# Altium footprint library 2020-12-10_20-22-55.PcbLib: 3 footprints
Each footprint in its own frame and in the unit in brackets; x right, y up, seen from the top. Pads: shape width x height; smd on the part's side, far side on the other; paste and mask are expansions set on the pad; w line width, h text height; cw(c..) or ccw(c..) is an arc to the next point about the centre after c.
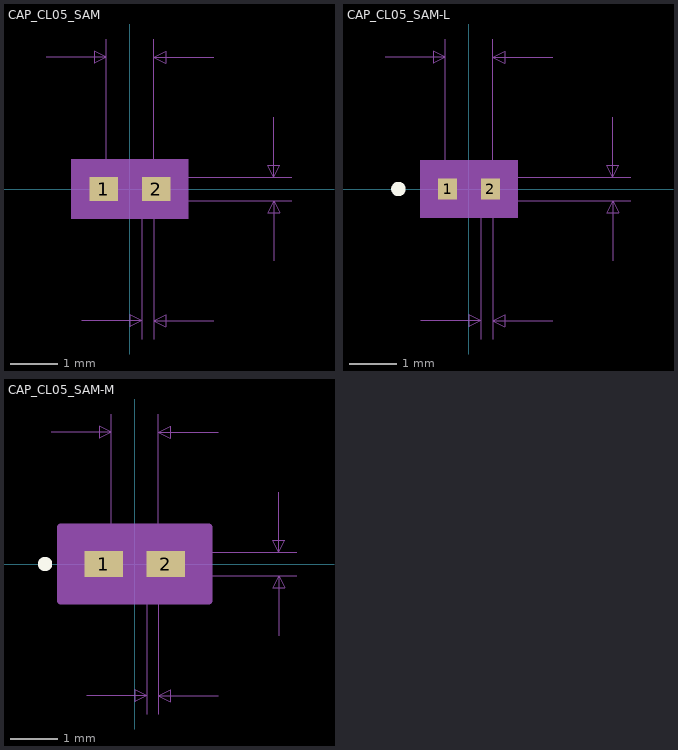
[diagram p0: the footprints below, top view; thin cyan lines are the x and y axes]

## CAP_CL05_SAM [mm]
pads (2):
  rect 0.606x0.5 smd paste+0 mask+0: 1(-0.553,0) 2(0.553,0)
Mechanical 5:
  region: 1.237,-0.631 -1.237,-0.631 -1.237,0.631 1.237,0.631
Mechanical 7:
  lines w0.025: -1.77,2.79 -0.5,2.79 ; -1.02,-2.79 0.25,-2.79 ; -0.5,0 -0.5,3.171 ; 0,-0.25 3.421,-0.25 ; 0,0.25 3.421,0.25 ; 0.25,-3.171 0.25,0 ; 0.5,-3.171 0.5,0 0.5,3.171 ; 1.77,-2.79 0.5,-2.79 ; 1.77,2.79 0.5,2.79 ; 3.04,-1.52 3.04,-0.25 ; 3.04,1.52 3.04,0.25 ; -0.5,2.79 -0.754,2.917 -0.754,2.663 -0.5,2.79 ; 0.25,-2.79 -0.004,-2.663 -0.004,-2.917 0.25,-2.79 ; 0.5,-2.79 0.754,-2.663 0.754,-2.917 0.5,-2.79 ; 0.5,2.79 0.754,2.917 0.754,2.663 0.5,2.79 ; 3.04,-0.25 2.913,-0.504 3.167,-0.504 3.04,-0.25 ; 3.04,0.25 2.913,0.504 3.167,0.504 3.04,0.25
  text "Default Padstyle: RX23p84Y19p69D0T" at -10.795,-7.108 h1.27
  text "Alternate 1 Padstyle: OX60Y90D30P" at -10.477,-9.648 h1.27
  text "Alternate 2 Padstyle: OX90Y60D30P" at -10.477,-12.188 h1.27
  text "0.02in/0.5mm" at 3.548,-0.318 h0.64
  text "0.039in/1mm" at -1.746,3.298 h0.64
  text "0.01in/0.25mm" at -1.689,-3.933 h0.64
Mechanical 13:
  circle w0: c-0.426,0 r0
  lines w0.025: -0.5,-0.25 -0.5,0.25 ; -0.5,-0.25 -0.25,-0.25 -0.25,0.25 -0.5,0.25 ; -0.5,-0.25 0.5,-0.25 ; -0.5,-0.25 -0.5,0.25 ; -0.5,0.25 0.5,0.25 ; 0.5,-0.25 0.25,-0.25 0.25,0.25 0.5,0.25 ; 0.5,-0.25 0.5,0.25 ; 0.5,-0.25 0.5,0.25
Mechanical 15:
  region: 1.11,-0.504 -1.11,-0.504 -1.11,0.504 1.11,0.504
  lines w0.152: -1.11,-0.504 -1.11,0.504 1.11,0.504 1.11,-0.504 -1.11,-0.504
3D body: height 0.25, standoff 0, extent 0,0 0.254,0.254

## CAP_CL05_SAM-L [mm]
pads (2):
  rect 0.402x0.449 smd paste+0 mask+0: 1(-0.451,0) 2(0.451,0)
Top Overlay:
  circle w0.152: c-1.491,0 r0.076
Mechanical 5:
  region: 1.033,-0.606 -1.033,-0.606 -1.033,0.606 1.033,0.606
Mechanical 7:
  lines w0.025: -1.77,2.79 -0.5,2.79 ; -1.02,-2.79 0.25,-2.79 ; -0.5,0 -0.5,3.171 ; 0,-0.25 3.421,-0.25 ; 0,0.25 3.421,0.25 ; 0.25,-3.171 0.25,0 ; 0.5,-3.171 0.5,0 0.5,3.171 ; 1.77,-2.79 0.5,-2.79 ; 1.77,2.79 0.5,2.79 ; 3.04,-1.52 3.04,-0.25 ; 3.04,1.52 3.04,0.25 ; -0.5,2.79 -0.754,2.917 -0.754,2.663 -0.5,2.79 ; 0.25,-2.79 -0.004,-2.663 -0.004,-2.917 0.25,-2.79 ; 0.5,-2.79 0.754,-2.663 0.754,-2.917 0.5,-2.79 ; 0.5,2.79 0.754,2.917 0.754,2.663 0.5,2.79 ; 3.04,-0.25 2.913,-0.504 3.167,-0.504 3.04,-0.25 ; 3.04,0.25 2.913,0.504 3.167,0.504 3.04,0.25
  text "Default Padstyle: RX15p84Y17p69D0T" at -10.795,-7.083 h1.27
  text "Alternate 1 Padstyle: OX60Y90D30P" at -10.477,-9.623 h1.27
  text "Alternate 2 Padstyle: OX90Y60D30P" at -10.477,-12.163 h1.27
  text "0.02in/0.5mm" at 3.548,-0.318 h0.64
  text "0.039in/1mm" at -1.746,3.298 h0.64
  text "0.01in/0.25mm" at -1.689,-3.933 h0.64
Mechanical 13:
  circle w0: c-0.324,0 r0.076
  lines w0.025: -0.5,-0.25 -0.5,0.25 ; -0.5,-0.25 -0.25,-0.25 -0.25,0.25 -0.5,0.25 ; -0.5,-0.25 0.5,-0.25 ; -0.5,-0.25 -0.5,0.25 ; -0.5,0.25 0.5,0.25 ; 0.5,-0.25 0.25,-0.25 0.25,0.25 0.5,0.25 ; 0.5,-0.25 0.5,0.25 ; 0.5,-0.25 0.5,0.25
Mechanical 15:
  region: 0.754,-0.326 -0.754,-0.326 -0.754,0.326 0.754,0.326
  lines w0.152: -0.754,-0.326 -0.754,0.326 0.754,0.326 0.754,-0.326 -0.754,-0.326
3D body: height 0.25, standoff 0, extent 0,0 0.254,0.254

## CAP_CL05_SAM-M [mm]
pads (2):
  rect 0.809x0.551 smd paste+0 mask+0: 1(-0.654,0) 2(0.654,0)
Top Overlay:
  circle w0.152: c-1.897,0 r0.076
Mechanical 5:
  region: 1.44,-0.656 -1.44,-0.656 -1.44,0.656 1.44,0.656
Mechanical 7:
  lines w0.025: -1.77,2.79 -0.5,2.79 ; -1.02,-2.79 0.25,-2.79 ; -0.5,0 -0.5,3.171 ; 0,-0.25 3.421,-0.25 ; 0,0.25 3.421,0.25 ; 0.25,-3.171 0.25,0 ; 0.5,-3.171 0.5,0 0.5,3.171 ; 1.77,-2.79 0.5,-2.79 ; 1.77,2.79 0.5,2.79 ; 3.04,-1.52 3.04,-0.25 ; 3.04,1.52 3.04,0.25 ; -0.5,2.79 -0.754,2.917 -0.754,2.663 -0.5,2.79 ; 0.25,-2.79 -0.004,-2.663 -0.004,-2.917 0.25,-2.79 ; 0.5,-2.79 0.754,-2.663 0.754,-2.917 0.5,-2.79 ; 0.5,2.79 0.754,2.917 0.754,2.663 0.5,2.79 ; 3.04,-0.25 2.913,-0.504 3.167,-0.504 3.04,-0.25 ; 3.04,0.25 2.913,0.504 3.167,0.504 3.04,0.25
  text "Default Padstyle: RX31p84Y21p69D0T" at -10.795,-7.133 h1.27
  text "Alternate 1 Padstyle: OX60Y90D30P" at -10.477,-9.673 h1.27
  text "Alternate 2 Padstyle: OX90Y60D30P" at -10.477,-12.213 h1.27
  text "0.02in/0.5mm" at 3.548,-0.318 h0.64
  text "0.039in/1mm" at -1.746,3.298 h0.64
  text "0.01in/0.25mm" at -1.689,-3.933 h0.64
Mechanical 13:
  circle w0: c-0.527,0 r0.076
  lines w0.025: -0.5,-0.25 -0.5,0.25 ; -0.5,-0.25 -0.25,-0.25 -0.25,0.25 -0.5,0.25 ; -0.5,-0.25 0.5,-0.25 ; -0.5,-0.25 -0.5,0.25 ; -0.5,0.25 0.5,0.25 ; 0.5,-0.25 0.25,-0.25 0.25,0.25 0.5,0.25 ; 0.5,-0.25 0.5,0.25 ; 0.5,-0.25 0.5,0.25
Mechanical 15:
  region: 1.567,-0.783 -1.567,-0.783 -1.567,0.783 1.567,0.783
  lines w0.152: -1.567,-0.783 -1.567,0.783 1.567,0.783 1.567,-0.783 -1.567,-0.783
3D body: height 0.25, standoff 0, extent 0,0 0.254,0.254